# Altium footprint library 2.10-LQFP封装.PcbLib: 97 footprints (part 5 of 7)
Each footprint in its own frame and in the unit in brackets; x right, y up, seen from the top. Pads: shape width x height; smd on the part's side, far side on the other; paste and mask are expansions set on the pad; w line width, h text height; cw(c..) or ccw(c..) is an arc to the next point about the centre after c.
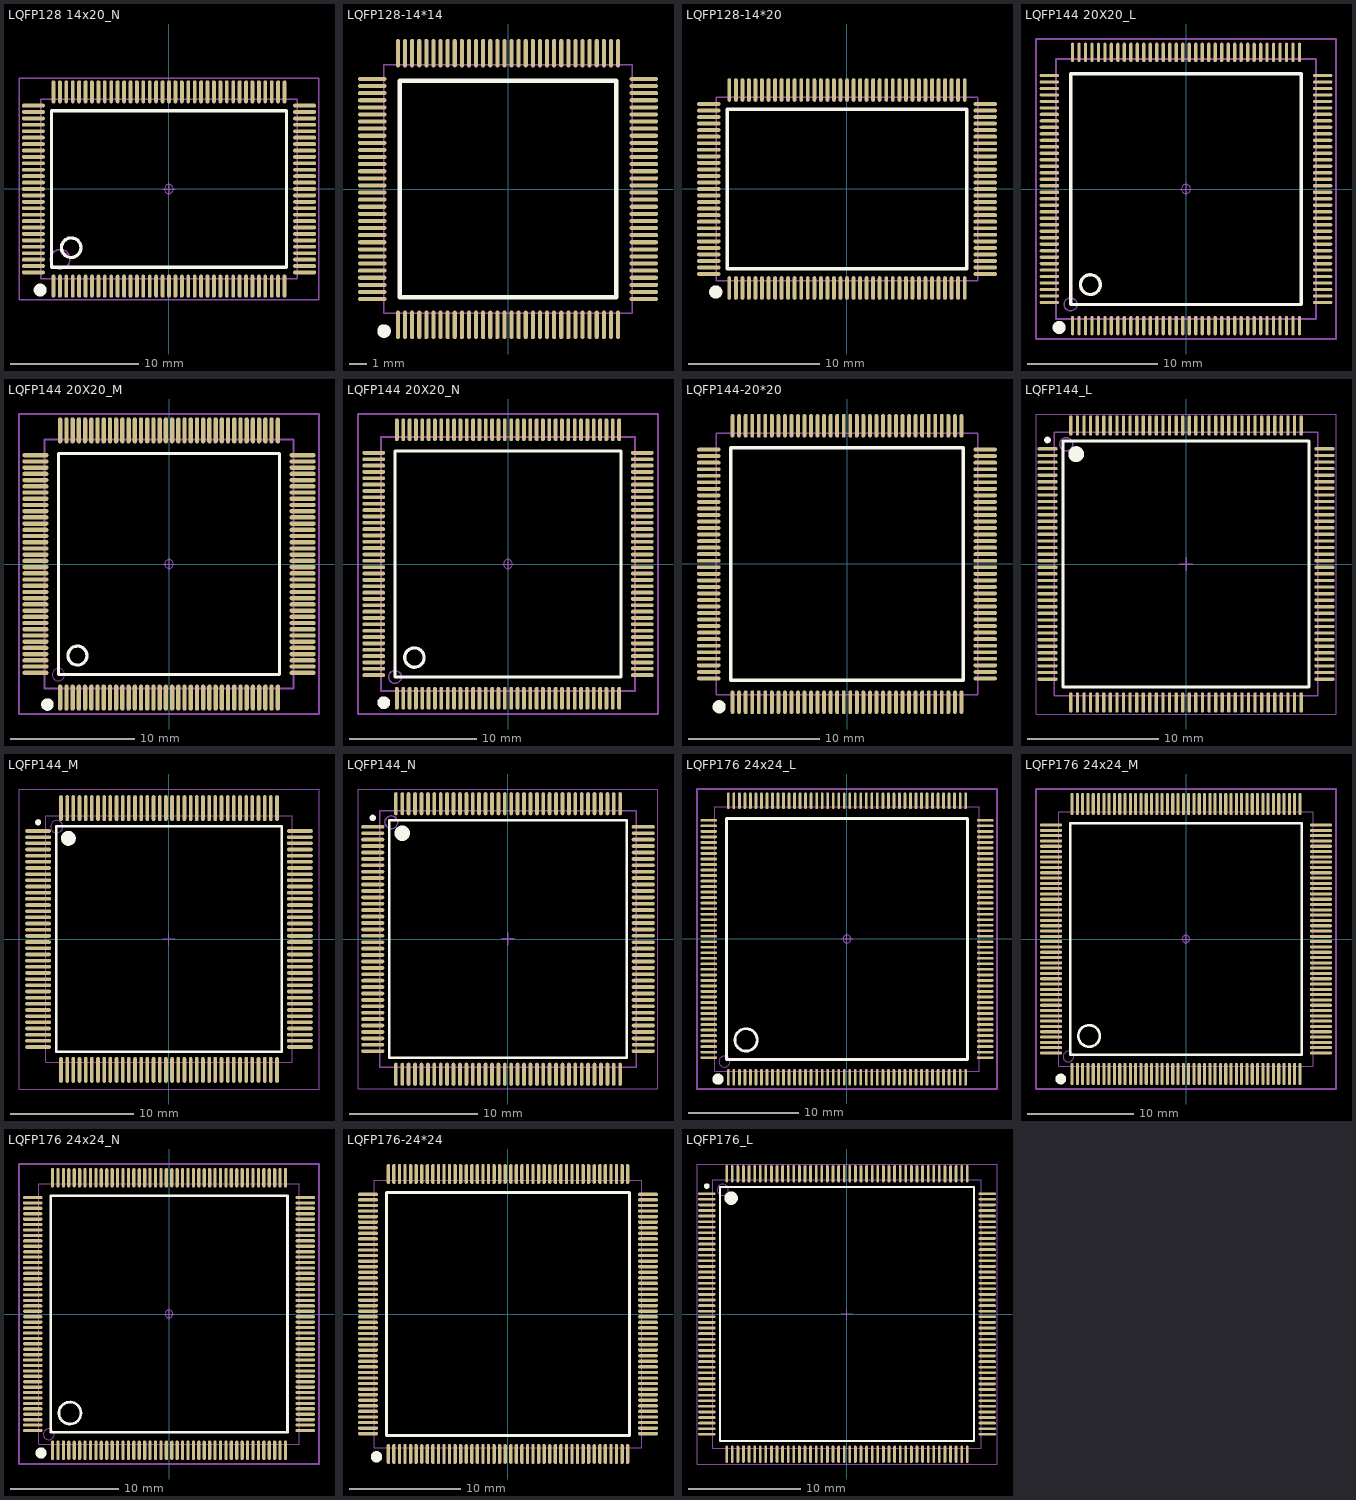
[diagram p4: the footprints below, top view; thin cyan lines are the x and y axes]

## LQFP128 14x20_N [mm] "128脚，体宽：14x20mm, 脚距：0.5mm           淘宝ID:黄晶宝石"
pads (128):
  oval 0.3x1.8 smd: 1(-8.998,-7.571) 2(-8.498,-7.571) 3(-7.998,-7.571) 4(-7.498,-7.571) 5(-6.998,-7.571) 6(-6.498,-7.571) 7(-5.998,-7.571) 8(-5.498,-7.571) 9(-4.998,-7.571) 10(-4.498,-7.571) 11(-3.998,-7.571) 12(-3.498,-7.571) 13(-2.998,-7.571) 14(-2.498,-7.571) 15(-1.998,-7.571) 16(-1.498,-7.571) 17(-0.998,-7.571) 18(-0.498,-7.571) 19(0.002,-7.571) 20(0.502,-7.571) 21(1.002,-7.571) 22(1.502,-7.571) 23(2.002,-7.571) 24(2.502,-7.571) 25(3.002,-7.571) 26(3.502,-7.571) 27(4.002,-7.571) 28(4.502,-7.571) 29(5.002,-7.571) 30(5.502,-7.571) 31(6.002,-7.571) 32(6.502,-7.571) 33(7.002,-7.571) 34(7.502,-7.571) 35(8.002,-7.571) 36(8.502,-7.571) 37(9.002,-7.571) 65(9.002,7.566) 66(8.502,7.566) 67(8.002,7.566) 68(7.502,7.566) 69(7.002,7.566) 70(6.502,7.566) 71(6.002,7.566) 72(5.502,7.566) 73(5.002,7.566) 74(4.502,7.566) 75(4.002,7.566) 76(3.502,7.566) 77(3.002,7.566) 78(2.502,7.566) 79(2.002,7.566) 80(1.502,7.566) 81(1.002,7.566) 82(0.502,7.566) 83(0.002,7.566) 84(-0.498,7.566) 85(-0.998,7.566) 86(-1.498,7.566) 87(-1.998,7.566) 88(-2.498,7.566) 89(-2.998,7.566) 90(-3.498,7.566) 91(-3.998,7.566) 92(-4.498,7.566) 93(-4.998,7.566) 94(-5.498,7.566) 95(-5.998,7.566) 96(-6.498,7.566) 97(-6.998,7.566) 98(-7.498,7.566) 99(-7.998,7.566) 100(-8.498,7.566) 101(-8.998,7.566)
  oval 1.8x0.3 smd: 38(10.57,-6.502) 39(10.57,-6.002) 40(10.57,-5.502) 41(10.57,-5.002) 42(10.57,-4.502) 43(10.57,-4.002) 44(10.57,-3.502) 45(10.57,-3.002) 46(10.57,-2.502) 47(10.57,-2.002) 48(10.57,-1.502) 49(10.57,-1.002) 50(10.57,-0.502) 51(10.57,-0.002) 52(10.57,0.498) 53(10.57,0.998) 54(10.57,1.498) 55(10.57,1.998) 56(10.57,2.498) 57(10.57,2.998) 58(10.57,3.498) 59(10.57,3.998) 60(10.57,4.498) 61(10.57,4.998) 62(10.57,5.498) 63(10.57,5.998) 64(10.57,6.498) 102(-10.566,6.498) 103(-10.566,5.998) 104(-10.566,5.498) 105(-10.566,4.998) 106(-10.566,4.498) 107(-10.566,3.998) 108(-10.566,3.498) 109(-10.566,2.998) 110(-10.566,2.498) 111(-10.566,1.998) 112(-10.566,1.498) 113(-10.566,0.998) 114(-10.566,0.498) 115(-10.566,-0.002) 116(-10.566,-0.502) 117(-10.566,-1.002) 118(-10.566,-1.502) 119(-10.566,-2.002) 120(-10.566,-2.502) 121(-10.566,-3.002) 122(-10.566,-3.502) 123(-10.566,-4.002) 124(-10.566,-4.502) 125(-10.566,-5.002) 126(-10.566,-5.502) 127(-10.566,-6.002) 128(-10.566,-6.502)
Top Overlay:
  circle w0.508: c-10.033,-7.874 r0.25
  circle w0.254: c-7.618,-4.574 r0.762
  lines w0.254: -9.142,-6.098 9.146,-6.098 9.146,6.094 -9.142,6.094 -9.142,-6.098
Mechanical 13:
  circle w0.1: c-8.474,-5.478 r0.762
  lines w0.1: -9.998,-7.002 -9.998,6.998 10.002,6.998 10.002,-7.002 -9.998,-7.002
Mechanical 15:
  circle w0.05: c0.002,-0.002 r0.35
  lines w0.05: -0.498,-0.002 0.502,-0.002 ; 0.002,-0.502 0.002,0.498
  lines w0.1: -11.682,-8.638 11.686,-8.638 11.686,8.634 -11.682,8.634 -11.682,-8.638
3D body "LQFP128-14x20.STEP": height 1.45, standoff -0.01, extent -11.001,-8.005 11.005,8

## LQFP128-14*14 [mm] "14x14mm, 0.4mm       淘宝ID:黄晶宝石"
pads (128):
  oval 0.23x1.6 smd: 1(-6.2,-7.648) 2(-5.8,-7.648) 3(-5.4,-7.648) 4(-5,-7.648) 5(-4.6,-7.648) 6(-4.2,-7.648) 7(-3.8,-7.648) 8(-3.4,-7.648) 9(-3,-7.648) 10(-2.6,-7.648) 11(-2.2,-7.648) 12(-1.8,-7.648) 13(-1.4,-7.648) 14(-1,-7.648) 15(-0.6,-7.648) 16(-0.2,-7.648) 17(0.2,-7.648) 18(0.6,-7.648) 19(1,-7.648) 20(1.4,-7.648) 21(1.8,-7.648) 22(2.2,-7.648) 23(2.6,-7.648) 24(3,-7.648) 25(3.4,-7.648) 26(3.8,-7.648) 27(4.2,-7.648) 28(4.6,-7.648) 29(5,-7.648) 30(5.4,-7.648) 31(5.8,-7.648) 32(6.2,-7.648) 65(6.2,7.653) 66(5.8,7.653) 67(5.4,7.653) 68(5,7.653) 69(4.6,7.653) 70(4.2,7.653) 71(3.8,7.653) 72(3.4,7.653) 73(3,7.653) 74(2.6,7.653) 75(2.2,7.653) 76(1.8,7.653) 77(1.4,7.653) 78(1,7.653) 79(0.6,7.653) 80(0.2,7.653) 81(-0.2,7.653) 82(-0.6,7.653) 83(-1,7.653) 84(-1.4,7.653) 85(-1.8,7.653) 86(-2.2,7.653) 87(-2.6,7.653) 88(-3,7.653) 89(-3.4,7.653) 90(-3.8,7.653) 91(-4.2,7.653) 92(-4.6,7.653) 93(-5,7.653) 94(-5.4,7.653) 95(-5.8,7.653) 96(-6.2,7.653)
  oval 1.6x0.23 smd: 33(7.651,-6.198) 34(7.651,-5.798) 35(7.651,-5.398) 36(7.651,-4.998) 37(7.651,-4.598) 38(7.651,-4.198) 39(7.651,-3.798) 40(7.651,-3.398) 41(7.651,-2.998) 42(7.651,-2.598) 43(7.651,-2.198) 44(7.651,-1.798) 45(7.651,-1.398) 46(7.651,-0.998) 47(7.651,-0.598) 48(7.651,-0.198) 49(7.651,0.202) 50(7.651,0.602) 51(7.651,1.002) 52(7.651,1.402) 53(7.651,1.802) 54(7.651,2.202) 55(7.651,2.602) 56(7.651,3.002) 57(7.651,3.402) 58(7.651,3.802) 59(7.651,4.202) 60(7.651,4.602) 61(7.651,5.002) 62(7.651,5.402) 63(7.651,5.802) 64(7.651,6.202) 97(-7.651,6.202) 98(-7.651,5.802) 99(-7.651,5.402) 100(-7.651,5.002) 101(-7.651,4.602) 102(-7.651,4.202) 103(-7.651,3.802) 104(-7.651,3.402) 105(-7.651,3.002) 106(-7.651,2.602) 107(-7.651,2.202) 108(-7.651,1.802) 109(-7.651,1.402) 110(-7.651,1.002) 111(-7.651,0.602) 112(-7.651,0.202) 113(-7.651,-0.198) 114(-7.651,-0.598) 115(-7.651,-0.998) 116(-7.651,-1.398) 117(-7.651,-1.798) 118(-7.651,-2.198) 119(-7.651,-2.598) 120(-7.651,-2.998) 121(-7.651,-3.398) 122(-7.651,-3.798) 123(-7.651,-4.198) 124(-7.651,-4.598) 125(-7.651,-4.998) 126(-7.651,-5.398) 127(-7.651,-5.798) 128(-7.651,-6.198)
Top Overlay:
  circle w0.508: c-6.985,-8.001 r0.127
  lines w0.254: -6.096,-6.094 6.096,-6.094 6.096,6.098 -6.096,6.098 -6.096,-6.094
Mechanical 13:
  lines w0.1: -7,-6.998 -7,7.002 7,7.002 7,-6.998 -7,-6.998
3D body "LQFP128-14x14.STEP": height 1.45, standoff 0, extent -8.003,-8.003 8.003,8.003

## LQFP128-14*20 [mm] "14x20mm, 0.5mm       淘宝ID:黄晶宝石"
pads (128):
  oval 0.3x1.8 smd: 1(-8.998,-7.571) 2(-8.498,-7.571) 3(-7.998,-7.571) 4(-7.498,-7.571) 5(-6.998,-7.571) 6(-6.498,-7.571) 7(-5.998,-7.571) 8(-5.498,-7.571) 9(-4.998,-7.571) 10(-4.498,-7.571) 11(-3.998,-7.571) 12(-3.498,-7.571) 13(-2.998,-7.571) 14(-2.498,-7.571) 15(-1.998,-7.571) 16(-1.498,-7.571) 17(-0.998,-7.571) 18(-0.498,-7.571) 19(0.002,-7.571) 20(0.502,-7.571) 21(1.002,-7.571) 22(1.502,-7.571) 23(2.002,-7.571) 24(2.502,-7.571) 25(3.002,-7.571) 26(3.502,-7.571) 27(4.002,-7.571) 28(4.502,-7.571) 29(5.002,-7.571) 30(5.502,-7.571) 31(6.002,-7.571) 32(6.502,-7.571) 33(7.002,-7.571) 34(7.502,-7.571) 35(8.002,-7.571) 36(8.502,-7.571) 37(9.002,-7.571) 65(9.002,7.566) 66(8.502,7.566) 67(8.002,7.566) 68(7.502,7.566) 69(7.002,7.566) 70(6.502,7.566) 71(6.002,7.566) 72(5.502,7.566) 73(5.002,7.566) 74(4.502,7.566) 75(4.002,7.566) 76(3.502,7.566) 77(3.002,7.566) 78(2.502,7.566) 79(2.002,7.566) 80(1.502,7.566) 81(1.002,7.566) 82(0.502,7.566) 83(0.002,7.566) 84(-0.498,7.566) 85(-0.998,7.566) 86(-1.498,7.566) 87(-1.998,7.566) 88(-2.498,7.566) 89(-2.998,7.566) 90(-3.498,7.566) 91(-3.998,7.566) 92(-4.498,7.566) 93(-4.998,7.566) 94(-5.498,7.566) 95(-5.998,7.566) 96(-6.498,7.566) 97(-6.998,7.566) 98(-7.498,7.566) 99(-7.998,7.566) 100(-8.498,7.566) 101(-8.998,7.566)
  oval 1.8x0.3 smd: 38(10.57,-6.502) 39(10.57,-6.002) 40(10.57,-5.502) 41(10.57,-5.002) 42(10.57,-4.502) 43(10.57,-4.002) 44(10.57,-3.502) 45(10.57,-3.002) 46(10.57,-2.502) 47(10.57,-2.002) 48(10.57,-1.502) 49(10.57,-1.002) 50(10.57,-0.502) 51(10.57,-0.002) 52(10.57,0.498) 53(10.57,0.998) 54(10.57,1.498) 55(10.57,1.998) 56(10.57,2.498) 57(10.57,2.998) 58(10.57,3.498) 59(10.57,3.998) 60(10.57,4.498) 61(10.57,4.998) 62(10.57,5.498) 63(10.57,5.998) 64(10.57,6.498) 102(-10.566,6.498) 103(-10.566,5.998) 104(-10.566,5.498) 105(-10.566,4.998) 106(-10.566,4.498) 107(-10.566,3.998) 108(-10.566,3.498) 109(-10.566,2.998) 110(-10.566,2.498) 111(-10.566,1.998) 112(-10.566,1.498) 113(-10.566,0.998) 114(-10.566,0.498) 115(-10.566,-0.002) 116(-10.566,-0.502) 117(-10.566,-1.002) 118(-10.566,-1.502) 119(-10.566,-2.002) 120(-10.566,-2.502) 121(-10.566,-3.002) 122(-10.566,-3.502) 123(-10.566,-4.002) 124(-10.566,-4.502) 125(-10.566,-5.002) 126(-10.566,-5.502) 127(-10.566,-6.002) 128(-10.566,-6.502)
Top Overlay:
  circle w0.508: c-10.033,-7.874 r0.25
  lines w0.254: -9.142,-6.098 9.146,-6.098 9.146,6.094 -9.142,6.094 -9.142,-6.098
Mechanical 13:
  lines w0.1: -9.998,-7.002 -9.998,6.998 10.002,6.998 10.002,-7.002 -9.998,-7.002
3D body "LQFP128-14x20.STEP": height 1.45, standoff 0, extent -11.003,-8.003 11.003,8.003

## LQFP144 20X20_L [mm] "144脚，体宽20x20mm，脚距0.5mm"
pads (144):
  oval 0.25x1.5 smd: 1(-8.75,-10.525) 2(-8.25,-10.525) 3(-7.75,-10.525) 4(-7.25,-10.525) 5(-6.75,-10.525) 6(-6.25,-10.525) 7(-5.75,-10.525) 8(-5.25,-10.525) 9(-4.75,-10.525) 10(-4.25,-10.525) 11(-3.75,-10.525) 12(-3.25,-10.525) 13(-2.75,-10.525) 14(-2.25,-10.525) 15(-1.75,-10.525) 16(-1.25,-10.525) 17(-0.75,-10.525) 18(-0.25,-10.525) 19(0.25,-10.525) 20(0.75,-10.525) 21(1.25,-10.525) 22(1.75,-10.525) 23(2.25,-10.525) 24(2.75,-10.525) 25(3.25,-10.525) 26(3.75,-10.525) 27(4.25,-10.525) 28(4.75,-10.525) 29(5.25,-10.525) 30(5.75,-10.525) 31(6.25,-10.525) 32(6.75,-10.525) 33(7.25,-10.525) 34(7.75,-10.525) 35(8.25,-10.525) 36(8.75,-10.525) 73(8.75,10.525) 74(8.25,10.525) 75(7.75,10.525) 76(7.25,10.525) 77(6.75,10.525) 78(6.25,10.525) 79(5.75,10.525) 80(5.25,10.525) 81(4.75,10.525) 82(4.25,10.525) 83(3.75,10.525) 84(3.25,10.525) 85(2.75,10.525) 86(2.25,10.525) 87(1.75,10.525) 88(1.25,10.525) 89(0.75,10.525) 90(0.25,10.525) 91(-0.25,10.525) 92(-0.75,10.525) 93(-1.25,10.525) 94(-1.75,10.525) 95(-2.25,10.525) 96(-2.75,10.525) 97(-3.25,10.525) 98(-3.75,10.525) 99(-4.25,10.525) 100(-4.75,10.525) 101(-5.25,10.525) 102(-5.75,10.525) 103(-6.25,10.525) 104(-6.75,10.525) 105(-7.25,10.525) 106(-7.75,10.525) 107(-8.25,10.525) 108(-8.75,10.525)
  oval 1.5x0.25 smd: 37(10.525,-8.75) 38(10.525,-8.25) 39(10.525,-7.75) 40(10.525,-7.25) 41(10.525,-6.75) 42(10.525,-6.25) 43(10.525,-5.75) 44(10.525,-5.25) 45(10.525,-4.75) 46(10.525,-4.25) 47(10.525,-3.75) 48(10.525,-3.25) 49(10.525,-2.75) 50(10.525,-2.25) 51(10.525,-1.75) 52(10.525,-1.25) 53(10.525,-0.75) 54(10.525,-0.25) 55(10.525,0.25) 56(10.525,0.75) 57(10.525,1.25) 58(10.525,1.75) 59(10.525,2.25) 60(10.525,2.75) 61(10.525,3.25) 62(10.525,3.75) 63(10.525,4.25) 64(10.525,4.75) 65(10.525,5.25) 66(10.525,5.75) 67(10.525,6.25) 68(10.525,6.75) 69(10.525,7.25) 70(10.525,7.75) 71(10.525,8.25) 72(10.525,8.75) 109(-10.525,8.75) 110(-10.525,8.25) 111(-10.525,7.75) 112(-10.525,7.25) 113(-10.525,6.75) 114(-10.525,6.25) 115(-10.525,5.75) 116(-10.525,5.25) 117(-10.525,4.75) 118(-10.525,4.25) 119(-10.525,3.75) 120(-10.525,3.25) 121(-10.525,2.75) 122(-10.525,2.25) 123(-10.525,1.75) 124(-10.525,1.25) 125(-10.525,0.75) 126(-10.525,0.25) 127(-10.525,-0.25) 128(-10.525,-0.75) 129(-10.525,-1.25) 130(-10.525,-1.75) 131(-10.525,-2.25) 132(-10.525,-2.75) 133(-10.525,-3.25) 134(-10.525,-3.75) 135(-10.525,-4.25) 136(-10.525,-4.75) 137(-10.525,-5.25) 138(-10.525,-5.75) 139(-10.525,-6.25) 140(-10.525,-6.75) 141(-10.525,-7.25) 142(-10.525,-7.75) 143(-10.525,-8.25) 144(-10.525,-8.75)
Top Overlay:
  circle w0.254: c-7.366,-7.366 r0.762
  circle w0.508: c-9.779,-10.668 r0.25
  lines w0.254: -8.89,-8.892 8.89,-8.892 8.89,8.89 -8.89,8.89 -8.89,-8.892
Mechanical 13:
  circle w0.1: c-8.894,-8.894 r0.5
  lines w0.15: -10,-10 -10,10 10,10 10,-10 -10,-10
Mechanical 15:
  circle w0.05: c0,0 r0.35
  lines w0.05: -0.5,0 0.5,0 ; 0,-0.5 0,0.5
  lines w0.15: -11.557,-11.557 11.557,-11.557 11.557,11.557 -11.557,11.557 -11.557,-11.557
3D body "LQFP144-20x20.STEP": height 1.45, standoff -0.01, extent -11.003,-11.003 11.003,11.003

## LQFP144 20X20_M [mm] "144脚，体宽20x20mm，脚距0.5mm"
pads (144):
  oval 0.35x2.1 smd: 1(-8.75,-10.747) 2(-8.25,-10.747) 3(-7.75,-10.747) 4(-7.25,-10.747) 5(-6.75,-10.747) 6(-6.25,-10.747) 7(-5.75,-10.747) 8(-5.25,-10.747) 9(-4.75,-10.747) 10(-4.25,-10.747) 11(-3.75,-10.747) 12(-3.25,-10.747) 13(-2.75,-10.747) 14(-2.25,-10.747) 15(-1.75,-10.747) 16(-1.25,-10.747) 17(-0.75,-10.747) 18(-0.25,-10.747) 19(0.25,-10.747) 20(0.75,-10.747) 21(1.25,-10.747) 22(1.75,-10.747) 23(2.25,-10.747) 24(2.75,-10.747) 25(3.25,-10.747) 26(3.75,-10.747) 27(4.25,-10.747) 28(4.75,-10.747) 29(5.25,-10.747) 30(5.75,-10.747) 31(6.25,-10.747) 32(6.75,-10.747) 33(7.25,-10.747) 34(7.75,-10.747) 35(8.25,-10.747) 36(8.75,-10.747) 73(8.75,10.747) 74(8.25,10.747) 75(7.75,10.747) 76(7.25,10.747) 77(6.75,10.747) 78(6.25,10.747) 79(5.75,10.747) 80(5.25,10.747) 81(4.75,10.747) 82(4.25,10.747) 83(3.75,10.747) 84(3.25,10.747) 85(2.75,10.747) 86(2.25,10.747) 87(1.75,10.747) 88(1.25,10.747) 89(0.75,10.747) 90(0.25,10.747) 91(-0.25,10.747) 92(-0.75,10.747) 93(-1.25,10.747) 94(-1.75,10.747) 95(-2.25,10.747) 96(-2.75,10.747) 97(-3.25,10.747) 98(-3.75,10.747) 99(-4.25,10.747) 100(-4.75,10.747) 101(-5.25,10.747) 102(-5.75,10.747) 103(-6.25,10.747) 104(-6.75,10.747) 105(-7.25,10.747) 106(-7.75,10.747) 107(-8.25,10.747) 108(-8.75,10.747)
  oval 2.1x0.35 smd: 37(10.747,-8.75) 38(10.747,-8.25) 39(10.747,-7.75) 40(10.747,-7.25) 41(10.747,-6.75) 42(10.747,-6.25) 43(10.747,-5.75) 44(10.747,-5.25) 45(10.747,-4.75) 46(10.747,-4.25) 47(10.747,-3.75) 48(10.747,-3.25) 49(10.747,-2.75) 50(10.747,-2.25) 51(10.747,-1.75) 52(10.747,-1.25) 53(10.747,-0.75) 54(10.747,-0.25) 55(10.747,0.25) 56(10.747,0.75) 57(10.747,1.25) 58(10.747,1.75) 59(10.747,2.25) 60(10.747,2.75) 61(10.747,3.25) 62(10.747,3.75) 63(10.747,4.25) 64(10.747,4.75) 65(10.747,5.25) 66(10.747,5.75) 67(10.747,6.25) 68(10.747,6.75) 69(10.747,7.25) 70(10.747,7.75) 71(10.747,8.25) 72(10.747,8.75) 109(-10.747,8.75) 110(-10.747,8.25) 111(-10.747,7.75) 112(-10.747,7.25) 113(-10.747,6.75) 114(-10.747,6.25) 115(-10.747,5.75) 116(-10.747,5.25) 117(-10.747,4.75) 118(-10.747,4.25) 119(-10.747,3.75) 120(-10.747,3.25) 121(-10.747,2.75) 122(-10.747,2.25) 123(-10.747,1.75) 124(-10.747,1.25) 125(-10.747,0.75) 126(-10.747,0.25) 127(-10.747,-0.25) 128(-10.747,-0.75) 129(-10.747,-1.25) 130(-10.747,-1.75) 131(-10.747,-2.25) 132(-10.747,-2.75) 133(-10.747,-3.25) 134(-10.747,-3.75) 135(-10.747,-4.25) 136(-10.747,-4.75) 137(-10.747,-5.25) 138(-10.747,-5.75) 139(-10.747,-6.25) 140(-10.747,-6.75) 141(-10.747,-7.25) 142(-10.747,-7.75) 143(-10.747,-8.25) 144(-10.747,-8.75)
Top Overlay:
  circle w0.508: c-9.779,-11.303 r0.25
  circle w0.254: c-7.366,-7.366 r0.762
  lines w0.254: -8.89,-8.892 8.89,-8.892 8.89,8.89 -8.89,8.89 -8.89,-8.892
Mechanical 13:
  circle w0.1: c-8.894,-8.894 r0.5
  lines w0.15: -10,-10 -10,10 10,10 10,-10 -10,-10
Mechanical 15:
  circle w0.05: c0,0 r0.35
  lines w0.05: -0.5,0 0.5,0 ; 0,-0.5 0,0.5
  lines w0.15: -12.065,-12.065 12.065,-12.065 12.065,12.065 -12.065,12.065 -12.065,-12.065
3D body "LQFP144-20x20.STEP": height 1.45, standoff -0.01, extent -11.003,-11.003 11.003,11.003

## LQFP144 20X20_N [mm] "144脚，体宽20x20mm，脚距0.5mm"
pads (144):
  oval 0.3x1.8 smd: 1(-8.75,-10.573) 2(-8.25,-10.573) 3(-7.75,-10.573) 4(-7.25,-10.573) 5(-6.75,-10.573) 6(-6.25,-10.573) 7(-5.75,-10.573) 8(-5.25,-10.573) 9(-4.75,-10.573) 10(-4.25,-10.573) 11(-3.75,-10.573) 12(-3.25,-10.573) 13(-2.75,-10.573) 14(-2.25,-10.573) 15(-1.75,-10.573) 16(-1.25,-10.573) 17(-0.75,-10.573) 18(-0.25,-10.573) 19(0.25,-10.573) 20(0.75,-10.573) 21(1.25,-10.573) 22(1.75,-10.573) 23(2.25,-10.573) 24(2.75,-10.573) 25(3.25,-10.573) 26(3.75,-10.573) 27(4.25,-10.573) 28(4.75,-10.573) 29(5.25,-10.573) 30(5.75,-10.573) 31(6.25,-10.573) 32(6.75,-10.573) 33(7.25,-10.573) 34(7.75,-10.573) 35(8.25,-10.573) 36(8.75,-10.573) 73(8.75,10.573) 74(8.25,10.573) 75(7.75,10.573) 76(7.25,10.573) 77(6.75,10.573) 78(6.25,10.573) 79(5.75,10.573) 80(5.25,10.573) 81(4.75,10.573) 82(4.25,10.573) 83(3.75,10.573) 84(3.25,10.573) 85(2.75,10.573) 86(2.25,10.573) 87(1.75,10.573) 88(1.25,10.573) 89(0.75,10.573) 90(0.25,10.573) 91(-0.25,10.573) 92(-0.75,10.573) 93(-1.25,10.573) 94(-1.75,10.573) 95(-2.25,10.573) 96(-2.75,10.573) 97(-3.25,10.573) 98(-3.75,10.573) 99(-4.25,10.573) 100(-4.75,10.573) 101(-5.25,10.573) 102(-5.75,10.573) 103(-6.25,10.573) 104(-6.75,10.573) 105(-7.25,10.573) 106(-7.75,10.573) 107(-8.25,10.573) 108(-8.75,10.573)
  oval 1.8x0.3 smd: 37(10.573,-8.75) 38(10.573,-8.25) 39(10.573,-7.75) 40(10.573,-7.25) 41(10.573,-6.75) 42(10.573,-6.25) 43(10.573,-5.75) 44(10.573,-5.25) 45(10.573,-4.75) 46(10.573,-4.25) 47(10.573,-3.75) 48(10.573,-3.25) 49(10.573,-2.75) 50(10.573,-2.25) 51(10.573,-1.75) 52(10.573,-1.25) 53(10.573,-0.75) 54(10.573,-0.25) 55(10.573,0.25) 56(10.573,0.75) 57(10.573,1.25) 58(10.573,1.75) 59(10.573,2.25) 60(10.573,2.75) 61(10.573,3.25) 62(10.573,3.75) 63(10.573,4.25) 64(10.573,4.75) 65(10.573,5.25) 66(10.573,5.75) 67(10.573,6.25) 68(10.573,6.75) 69(10.573,7.25) 70(10.573,7.75) 71(10.573,8.25) 72(10.573,8.75) 109(-10.573,8.75) 110(-10.573,8.25) 111(-10.573,7.75) 112(-10.573,7.25) 113(-10.573,6.75) 114(-10.573,6.25) 115(-10.573,5.75) 116(-10.573,5.25) 117(-10.573,4.75) 118(-10.573,4.25) 119(-10.573,3.75) 120(-10.573,3.25) 121(-10.573,2.75) 122(-10.573,2.25) 123(-10.573,1.75) 124(-10.573,1.25) 125(-10.573,0.75) 126(-10.573,0.25) 127(-10.573,-0.25) 128(-10.573,-0.75) 129(-10.573,-1.25) 130(-10.573,-1.75) 131(-10.573,-2.25) 132(-10.573,-2.75) 133(-10.573,-3.25) 134(-10.573,-3.75) 135(-10.573,-4.25) 136(-10.573,-4.75) 137(-10.573,-5.25) 138(-10.573,-5.75) 139(-10.573,-6.25) 140(-10.573,-6.75) 141(-10.573,-7.25) 142(-10.573,-7.75) 143(-10.573,-8.25) 144(-10.573,-8.75)
Top Overlay:
  circle w0.508: c-9.779,-10.922 r0.25
  circle w0.254: c-7.366,-7.366 r0.762
  lines w0.254: -8.89,-8.892 -8.89,8.89 8.89,8.89 8.89,-8.892 -8.89,-8.892
Mechanical 13:
  circle w0.1: c-8.894,-8.894 r0.5
  lines w0.15: -10,-10 10,-10 10,10 -10,10 -10,-10
Mechanical 15:
  circle w0.05: c0,0 r0.35
  lines w0.05: -0.5,0 0.5,0 ; 0,-0.5 0,0.5
  lines w0.15: -11.811,-11.811 -11.811,11.811 11.811,11.811 11.811,-11.811 -11.811,-11.811
3D body "LQFP144-20x20.STEP": height 1.45, standoff -0.01, extent -11.003,-11.003 11.003,11.003

## LQFP144-20*20 [mm] "20x20mm，0.5mm       淘宝ID:黄晶宝石"
pads (144):
  oval 0.3x1.8 smd: 1(-8.75,-10.573) 2(-8.25,-10.573) 3(-7.75,-10.573) 4(-7.25,-10.573) 5(-6.75,-10.573) 6(-6.25,-10.573) 7(-5.75,-10.573) 8(-5.25,-10.573) 9(-4.75,-10.573) 10(-4.25,-10.573) 11(-3.75,-10.573) 12(-3.25,-10.573) 13(-2.75,-10.573) 14(-2.25,-10.573) 15(-1.75,-10.573) 16(-1.25,-10.573) 17(-0.75,-10.573) 18(-0.25,-10.573) 19(0.25,-10.573) 20(0.75,-10.573) 21(1.25,-10.573) 22(1.75,-10.573) 23(2.25,-10.573) 24(2.75,-10.573) 25(3.25,-10.573) 26(3.75,-10.573) 27(4.25,-10.573) 28(4.75,-10.573) 29(5.25,-10.573) 30(5.75,-10.573) 31(6.25,-10.573) 32(6.75,-10.573) 33(7.25,-10.573) 34(7.75,-10.573) 35(8.25,-10.573) 36(8.75,-10.573) 73(8.75,10.573) 74(8.25,10.573) 75(7.75,10.573) 76(7.25,10.573) 77(6.75,10.573) 78(6.25,10.573) 79(5.75,10.573) 80(5.25,10.573) 81(4.75,10.573) 82(4.25,10.573) 83(3.75,10.573) 84(3.25,10.573) 85(2.75,10.573) 86(2.25,10.573) 87(1.75,10.573) 88(1.25,10.573) 89(0.75,10.573) 90(0.25,10.573) 91(-0.25,10.573) 92(-0.75,10.573) 93(-1.25,10.573) 94(-1.75,10.573) 95(-2.25,10.573) 96(-2.75,10.573) 97(-3.25,10.573) 98(-3.75,10.573) 99(-4.25,10.573) 100(-4.75,10.573) 101(-5.25,10.573) 102(-5.75,10.573) 103(-6.25,10.573) 104(-6.75,10.573) 105(-7.25,10.573) 106(-7.75,10.573) 107(-8.25,10.573) 108(-8.75,10.573)
  oval 1.8x0.3 smd: 37(10.573,-8.75) 38(10.573,-8.25) 39(10.573,-7.75) 40(10.573,-7.25) 41(10.573,-6.75) 42(10.573,-6.25) 43(10.573,-5.75) 44(10.573,-5.25) 45(10.573,-4.75) 46(10.573,-4.25) 47(10.573,-3.75) 48(10.573,-3.25) 49(10.573,-2.75) 50(10.573,-2.25) 51(10.573,-1.75) 52(10.573,-1.25) 53(10.573,-0.75) 54(10.573,-0.25) 55(10.573,0.25) 56(10.573,0.75) 57(10.573,1.25) 58(10.573,1.75) 59(10.573,2.25) 60(10.573,2.75) 61(10.573,3.25) 62(10.573,3.75) 63(10.573,4.25) 64(10.573,4.75) 65(10.573,5.25) 66(10.573,5.75) 67(10.573,6.25) 68(10.573,6.75) 69(10.573,7.25) 70(10.573,7.75) 71(10.573,8.25) 72(10.573,8.75) 109(-10.573,8.75) 110(-10.573,8.25) 111(-10.573,7.75) 112(-10.573,7.25) 113(-10.573,6.75) 114(-10.573,6.25) 115(-10.573,5.75) 116(-10.573,5.25) 117(-10.573,4.75) 118(-10.573,4.25) 119(-10.573,3.75) 120(-10.573,3.25) 121(-10.573,2.75) 122(-10.573,2.25) 123(-10.573,1.75) 124(-10.573,1.25) 125(-10.573,0.75) 126(-10.573,0.25) 127(-10.573,-0.25) 128(-10.573,-0.75) 129(-10.573,-1.25) 130(-10.573,-1.75) 131(-10.573,-2.25) 132(-10.573,-2.75) 133(-10.573,-3.25) 134(-10.573,-3.75) 135(-10.573,-4.25) 136(-10.573,-4.75) 137(-10.573,-5.25) 138(-10.573,-5.75) 139(-10.573,-6.25) 140(-10.573,-6.75) 141(-10.573,-7.25) 142(-10.573,-7.75) 143(-10.573,-8.25) 144(-10.573,-8.75)
Top Overlay:
  circle w0.508: c-9.779,-10.922 r0.25
  lines w0.254: -8.89,-8.892 -8.89,8.89 8.89,8.89 8.89,-8.892 -8.89,-8.892
Mechanical 13:
  lines w0.15: -10,-10 10,-10 10,10 -10,10 -10,-10
3D body "LQFP144-20x20.STEP": height 1.45, standoff 0, extent -11.049,-11.049 10.957,10.957

## LQFP144_L [mm] "封装库来自淘宝 ID：黄晶宝石 Thin QFP, 144-Leads, Body 20x20mm, Pitch 0.5mm, IPC High Density"
height 1.6
pads (144):
  oval 1.55x0.25 smd: 1(-10.525,8.75) 2(-10.525,8.25) 3(-10.525,7.75) 4(-10.525,7.25) 5(-10.525,6.75) 6(-10.525,6.25) 7(-10.525,5.75) 8(-10.525,5.25) 9(-10.525,4.75) 10(-10.525,4.25) 11(-10.525,3.75) 12(-10.525,3.25) 13(-10.525,2.75) 14(-10.525,2.25) 15(-10.525,1.75) 16(-10.525,1.25) 17(-10.525,0.75) 18(-10.525,0.25) 19(-10.525,-0.25) 20(-10.525,-0.75) 21(-10.525,-1.25) 22(-10.525,-1.75) 23(-10.525,-2.25) 24(-10.525,-2.75) 25(-10.525,-3.25) 26(-10.525,-3.75) 27(-10.525,-4.25) 28(-10.525,-4.75) 29(-10.525,-5.25) 30(-10.525,-5.75) 31(-10.525,-6.25) 32(-10.525,-6.75) 33(-10.525,-7.25) 34(-10.525,-7.75) 35(-10.525,-8.25) 36(-10.525,-8.75) 73(10.525,-8.75) 74(10.525,-8.25) 75(10.525,-7.75) 76(10.525,-7.25) 77(10.525,-6.75) 78(10.525,-6.25) 79(10.525,-5.75) 80(10.525,-5.25) 81(10.525,-4.75) 82(10.525,-4.25) 83(10.525,-3.75) 84(10.525,-3.25) 85(10.525,-2.75) 86(10.525,-2.25) 87(10.525,-1.75) 88(10.525,-1.25) 89(10.525,-0.75) 90(10.525,-0.25) 91(10.525,0.25) 92(10.525,0.75) 93(10.525,1.25) 94(10.525,1.75) 95(10.525,2.25) 96(10.525,2.75) 97(10.525,3.25) 98(10.525,3.75) 99(10.525,4.25) 100(10.525,4.75) 101(10.525,5.25) 102(10.525,5.75) 103(10.525,6.25) 104(10.525,6.75) 105(10.525,7.25) 106(10.525,7.75) 107(10.525,8.25) 108(10.525,8.75)
  oval 0.25x1.55 smd: 37(-8.75,-10.525) 38(-8.25,-10.525) 39(-7.75,-10.525) 40(-7.25,-10.525) 41(-6.75,-10.525) 42(-6.25,-10.525) 43(-5.75,-10.525) 44(-5.25,-10.525) 45(-4.75,-10.525) 46(-4.25,-10.525) 47(-3.75,-10.525) 48(-3.25,-10.525) 49(-2.75,-10.525) 50(-2.25,-10.525) 51(-1.75,-10.525) 52(-1.25,-10.525) 53(-0.75,-10.525) 54(-0.25,-10.525) 55(0.25,-10.525) 56(0.75,-10.525) 57(1.25,-10.525) 58(1.75,-10.525) 59(2.25,-10.525) 60(2.75,-10.525) 61(3.25,-10.525) 62(3.75,-10.525) 63(4.25,-10.525) 64(4.75,-10.525) 65(5.25,-10.525) 66(5.75,-10.525) 67(6.25,-10.525) 68(6.75,-10.525) 69(7.25,-10.525) 70(7.75,-10.525) 71(8.25,-10.525) 72(8.75,-10.525) 109(8.75,10.525) 110(8.25,10.525) 111(7.75,10.525) 112(7.25,10.525) 113(6.75,10.525) 114(6.25,10.525) 115(5.75,10.525) 116(5.25,10.525) 117(4.75,10.525) 118(4.25,10.525) 119(3.75,10.525) 120(3.25,10.525) 121(2.75,10.525) 122(2.25,10.525) 123(1.75,10.525) 124(1.25,10.525) 125(0.75,10.525) 126(0.25,10.525) 127(-0.25,10.525) 128(-0.75,10.525) 129(-1.25,10.525) 130(-1.75,10.525) 131(-2.25,10.525) 132(-2.75,10.525) 133(-3.25,10.525) 134(-3.75,10.525) 135(-4.25,10.525) 136(-4.75,10.525) 137(-5.25,10.525) 138(-5.75,10.525) 139(-6.25,10.525) 140(-6.75,10.525) 141(-7.25,10.525) 142(-7.75,10.525) 143(-8.25,10.525) 144(-8.75,10.525)
Top Overlay:
  circle w0.6: c-8.35,8.35 r0.3
  circle w0.25: c-10.525,9.425 r0.125
  lines w0.2: -9.35,-9.35 9.35,-9.35 9.35,9.35 -9.35,9.35 -9.35,-9.35
Mechanical 13:
  circle w0.1: c-9.1,9.1 r0.5
  lines w0.1: -10,-10 10,-10 10,10 -10,10 -10,-10
Mechanical 15:
  lines w0.05: -11.4,-11.4 11.4,-11.4 11.4,11.4 -11.4,11.4 -11.4,-11.4
  lines w0.1: -0.5,0 0.5,0 ; 0,-0.5 0,0.5
3D body "LQFP144-20x20.STEP": height 1.45, standoff -0.01, extent -11.003,-11.049 11.003,10.957

## LQFP144_M [mm] "封装库来自淘宝 ID：黄晶宝石 Thin QFP, 144-Leads, Body 20x20mm, Pitch 0.5mm, IPC Low Density"
height 1.6
pads (144):
  oval 2.1x0.3 smd: 1(-10.6,8.75) 2(-10.6,8.25) 3(-10.6,7.75) 4(-10.6,7.25) 5(-10.6,6.75) 6(-10.6,6.25) 7(-10.6,5.75) 8(-10.6,5.25) 9(-10.6,4.75) 10(-10.6,4.25) 11(-10.6,3.75) 12(-10.6,3.25) 13(-10.6,2.75) 14(-10.6,2.25) 15(-10.6,1.75) 16(-10.6,1.25) 17(-10.6,0.75) 18(-10.6,0.25) 19(-10.6,-0.25) 20(-10.6,-0.75) 21(-10.6,-1.25) 22(-10.6,-1.75) 23(-10.6,-2.25) 24(-10.6,-2.75) 25(-10.6,-3.25) 26(-10.6,-3.75) 27(-10.6,-4.25) 28(-10.6,-4.75) 29(-10.6,-5.25) 30(-10.6,-5.75) 31(-10.6,-6.25) 32(-10.6,-6.75) 33(-10.6,-7.25) 34(-10.6,-7.75) 35(-10.6,-8.25) 36(-10.6,-8.75) 73(10.6,-8.75) 74(10.6,-8.25) 75(10.6,-7.75) 76(10.6,-7.25) 77(10.6,-6.75) 78(10.6,-6.25) 79(10.6,-5.75) 80(10.6,-5.25) 81(10.6,-4.75) 82(10.6,-4.25) 83(10.6,-3.75) 84(10.6,-3.25) 85(10.6,-2.75) 86(10.6,-2.25) 87(10.6,-1.75) 88(10.6,-1.25) 89(10.6,-0.75) 90(10.6,-0.25) 91(10.6,0.25) 92(10.6,0.75) 93(10.6,1.25) 94(10.6,1.75) 95(10.6,2.25) 96(10.6,2.75) 97(10.6,3.25) 98(10.6,3.75) 99(10.6,4.25) 100(10.6,4.75) 101(10.6,5.25) 102(10.6,5.75) 103(10.6,6.25) 104(10.6,6.75) 105(10.6,7.25) 106(10.6,7.75) 107(10.6,8.25) 108(10.6,8.75)
  oval 0.3x2.1 smd: 37(-8.75,-10.6) 38(-8.25,-10.6) 39(-7.75,-10.6) 40(-7.25,-10.6) 41(-6.75,-10.6) 42(-6.25,-10.6) 43(-5.75,-10.6) 44(-5.25,-10.6) 45(-4.75,-10.6) 46(-4.25,-10.6) 47(-3.75,-10.6) 48(-3.25,-10.6) 49(-2.75,-10.6) 50(-2.25,-10.6) 51(-1.75,-10.6) 52(-1.25,-10.6) 53(-0.75,-10.6) 54(-0.25,-10.6) 55(0.25,-10.6) 56(0.75,-10.6) 57(1.25,-10.6) 58(1.75,-10.6) 59(2.25,-10.6) 60(2.75,-10.6) 61(3.25,-10.6) 62(3.75,-10.6) 63(4.25,-10.6) 64(4.75,-10.6) 65(5.25,-10.6) 66(5.75,-10.6) 67(6.25,-10.6) 68(6.75,-10.6) 69(7.25,-10.6) 70(7.75,-10.6) 71(8.25,-10.6) 72(8.75,-10.6) 109(8.75,10.6) 110(8.25,10.6) 111(7.75,10.6) 112(7.25,10.6) 113(6.75,10.6) 114(6.25,10.6) 115(5.75,10.6) 116(5.25,10.6) 117(4.75,10.6) 118(4.25,10.6) 119(3.75,10.6) 120(3.25,10.6) 121(2.75,10.6) 122(2.25,10.6) 123(1.75,10.6) 124(1.25,10.6) 125(0.75,10.6) 126(0.25,10.6) 127(-0.25,10.6) 128(-0.75,10.6) 129(-1.25,10.6) 130(-1.75,10.6) 131(-2.25,10.6) 132(-2.75,10.6) 133(-3.25,10.6) 134(-3.75,10.6) 135(-4.25,10.6) 136(-4.75,10.6) 137(-5.25,10.6) 138(-5.75,10.6) 139(-6.25,10.6) 140(-6.75,10.6) 141(-7.25,10.6) 142(-7.75,10.6) 143(-8.25,10.6) 144(-8.75,10.6)
Top Overlay:
  circle w0.25: c-10.6,9.45 r0.125
  circle w0.6: c-8.15,8.15 r0.3
  lines w0.2: -9.15,-9.15 -9.15,9.15 9.15,9.15 9.15,-9.15 -9.15,-9.15
Mechanical 13:
  circle w0.1: c-9.1,9.1 r0.5
  lines w0.1: -10,-10 -10,10 10,10 10,-10 -10,-10
Mechanical 15:
  lines w0.05: -12.15,-12.15 -12.15,12.15 12.15,12.15 12.15,-12.15 -12.15,-12.15
  lines w0.1: -0.5,0 0.5,0 ; 0,-0.5 0,0.5
3D body "LQFP144-20x20.STEP": height 1.45, standoff -0.01, extent -11.003,-11.049 11.003,10.957

## LQFP144_N [mm] "封装库来自淘宝 ID：黄晶宝石 Thin QFP, 144-Leads, Body 20x20mm, Pitch 0.5mm, IPC Medium Density"
height 1.6
pads (144):
  oval 1.8x0.3 smd: 1(-10.55,8.75) 2(-10.55,8.25) 3(-10.55,7.75) 4(-10.55,7.25) 5(-10.55,6.75) 6(-10.55,6.25) 7(-10.55,5.75) 8(-10.55,5.25) 9(-10.55,4.75) 10(-10.55,4.25) 11(-10.55,3.75) 12(-10.55,3.25) 13(-10.55,2.75) 14(-10.55,2.25) 15(-10.55,1.75) 16(-10.55,1.25) 17(-10.55,0.75) 18(-10.55,0.25) 19(-10.55,-0.25) 20(-10.55,-0.75) 21(-10.55,-1.25) 22(-10.55,-1.75) 23(-10.55,-2.25) 24(-10.55,-2.75) 25(-10.55,-3.25) 26(-10.55,-3.75) 27(-10.55,-4.25) 28(-10.55,-4.75) 29(-10.55,-5.25) 30(-10.55,-5.75) 31(-10.55,-6.25) 32(-10.55,-6.75) 33(-10.55,-7.25) 34(-10.55,-7.75) 35(-10.55,-8.25) 36(-10.55,-8.75) 73(10.55,-8.75) 74(10.55,-8.25) 75(10.55,-7.75) 76(10.55,-7.25) 77(10.55,-6.75) 78(10.55,-6.25) 79(10.55,-5.75) 80(10.55,-5.25) 81(10.55,-4.75) 82(10.55,-4.25) 83(10.55,-3.75) 84(10.55,-3.25) 85(10.55,-2.75) 86(10.55,-2.25) 87(10.55,-1.75) 88(10.55,-1.25) 89(10.55,-0.75) 90(10.55,-0.25) 91(10.55,0.25) 92(10.55,0.75) 93(10.55,1.25) 94(10.55,1.75) 95(10.55,2.25) 96(10.55,2.75) 97(10.55,3.25) 98(10.55,3.75) 99(10.55,4.25) 100(10.55,4.75) 101(10.55,5.25) 102(10.55,5.75) 103(10.55,6.25) 104(10.55,6.75) 105(10.55,7.25) 106(10.55,7.75) 107(10.55,8.25) 108(10.55,8.75)
  oval 0.3x1.8 smd: 37(-8.75,-10.55) 38(-8.25,-10.55) 39(-7.75,-10.55) 40(-7.25,-10.55) 41(-6.75,-10.55) 42(-6.25,-10.55) 43(-5.75,-10.55) 44(-5.25,-10.55) 45(-4.75,-10.55) 46(-4.25,-10.55) 47(-3.75,-10.55) 48(-3.25,-10.55) 49(-2.75,-10.55) 50(-2.25,-10.55) 51(-1.75,-10.55) 52(-1.25,-10.55) 53(-0.75,-10.55) 54(-0.25,-10.55) 55(0.25,-10.55) 56(0.75,-10.55) 57(1.25,-10.55) 58(1.75,-10.55) 59(2.25,-10.55) 60(2.75,-10.55) 61(3.25,-10.55) 62(3.75,-10.55) 63(4.25,-10.55) 64(4.75,-10.55) 65(5.25,-10.55) 66(5.75,-10.55) 67(6.25,-10.55) 68(6.75,-10.55) 69(7.25,-10.55) 70(7.75,-10.55) 71(8.25,-10.55) 72(8.75,-10.55) 109(8.75,10.55) 110(8.25,10.55) 111(7.75,10.55) 112(7.25,10.55) 113(6.75,10.55) 114(6.25,10.55) 115(5.75,10.55) 116(5.25,10.55) 117(4.75,10.55) 118(4.25,10.55) 119(3.75,10.55) 120(3.25,10.55) 121(2.75,10.55) 122(2.25,10.55) 123(1.75,10.55) 124(1.25,10.55) 125(0.75,10.55) 126(0.25,10.55) 127(-0.25,10.55) 128(-0.75,10.55) 129(-1.25,10.55) 130(-1.75,10.55) 131(-2.25,10.55) 132(-2.75,10.55) 133(-3.25,10.55) 134(-3.75,10.55) 135(-4.25,10.55) 136(-4.75,10.55) 137(-5.25,10.55) 138(-5.75,10.55) 139(-6.25,10.55) 140(-6.75,10.55) 141(-7.25,10.55) 142(-7.75,10.55) 143(-8.25,10.55) 144(-8.75,10.55)
Top Overlay:
  circle w0.25: c-10.55,9.45 r0.125
  circle w0.6: c-8.25,8.25 r0.3
  lines w0.2: -9.25,-9.25 -9.25,9.25 9.25,9.25 9.25,-9.25 -9.25,-9.25
Mechanical 13:
  circle w0.1: c-9.1,9.1 r0.5
  lines w0.1: -10,-10 -10,10 10,10 10,-10 -10,-10
Mechanical 15:
  lines w0.05: -11.7,-11.7 -11.7,11.7 11.7,11.7 11.7,-11.7 -11.7,-11.7
  lines w0.1: -0.5,0 0.5,0 ; 0,-0.5 0,0.5
3D body "LQFP144-20x20.STEP": height 1.45, standoff -0.01, extent -11.003,-11.049 11.003,10.957

## LQFP176 24x24_L [mm] "176脚，体宽24x24mm，脚距0.5mm"
height 1.6
pads (176):
  oval 0.25x1.5 smd: 1(-10.75,-12.525) 2(-10.25,-12.525) 3(-9.75,-12.525) 4(-9.25,-12.525) 5(-8.75,-12.525) 6(-8.25,-12.525) 7(-7.75,-12.525) 8(-7.25,-12.525) 9(-6.75,-12.525) 10(-6.25,-12.525) 11(-5.75,-12.525) 12(-5.25,-12.525) 13(-4.75,-12.525) 14(-4.25,-12.525) 15(-3.75,-12.525) 16(-3.25,-12.525) 17(-2.75,-12.525) 18(-2.25,-12.525) 19(-1.75,-12.525) 20(-1.25,-12.525) 21(-0.75,-12.525) 22(-0.25,-12.525) 23(0.25,-12.525) 24(0.75,-12.525) 25(1.25,-12.525) 26(1.75,-12.525) 27(2.25,-12.525) 28(2.75,-12.525) 29(3.25,-12.525) 30(3.75,-12.525) 31(4.25,-12.525) 32(4.75,-12.525) 33(5.25,-12.525) 34(5.75,-12.525) 35(6.25,-12.525) 36(6.75,-12.525) 37(7.25,-12.525) 38(7.75,-12.525) 39(8.25,-12.525) 40(8.75,-12.525) 41(9.25,-12.525) 42(9.75,-12.525) 43(10.25,-12.525) 44(10.75,-12.525) 89(10.75,12.525) 90(10.25,12.525) 91(9.75,12.525) 92(9.25,12.525) 93(8.75,12.525) 94(8.25,12.525) 95(7.75,12.525) 96(7.25,12.525) 97(6.75,12.525) 98(6.25,12.525) 99(5.75,12.525) 100(5.25,12.525) 101(4.75,12.525) 102(4.25,12.525) 103(3.75,12.525) 104(3.25,12.525) 105(2.75,12.525) 106(2.25,12.525) 107(1.75,12.525) 108(1.25,12.525) 109(0.75,12.525) 110(0.25,12.525) 111(-0.25,12.525) 112(-0.75,12.525) 113(-1.25,12.525) 114(-1.75,12.525) 115(-2.25,12.525) 116(-2.75,12.525) 117(-3.25,12.525) 118(-3.75,12.525) 119(-4.25,12.525) 120(-4.75,12.525) 121(-5.25,12.525) 122(-5.75,12.525) 123(-6.25,12.525) 124(-6.75,12.525) 125(-7.25,12.525) 126(-7.75,12.525) 127(-8.25,12.525) 128(-8.75,12.525) 129(-9.25,12.525) 130(-9.75,12.525) 131(-10.25,12.525) 132(-10.75,12.525)
  oval 1.5x0.25 smd: 45(12.525,-10.75) 46(12.525,-10.25) 47(12.525,-9.75) 48(12.525,-9.25) 49(12.525,-8.75) 50(12.525,-8.25) 51(12.525,-7.75) 52(12.525,-7.25) 53(12.525,-6.75) 54(12.525,-6.25) 55(12.525,-5.75) 56(12.525,-5.25) 57(12.525,-4.75) 58(12.525,-4.25) 59(12.525,-3.75) 60(12.525,-3.25) 61(12.525,-2.75) 62(12.525,-2.25) 63(12.525,-1.75) 64(12.525,-1.25) 65(12.525,-0.75) 66(12.525,-0.25) 67(12.525,0.25) 68(12.525,0.75) 69(12.525,1.25) 70(12.525,1.75) 71(12.525,2.25) 72(12.525,2.75) 73(12.525,3.25) 74(12.525,3.75) 75(12.525,4.25) 76(12.525,4.75) 77(12.525,5.25) 78(12.525,5.75) 79(12.525,6.25) 80(12.525,6.75) 81(12.525,7.25) 82(12.525,7.75) 83(12.525,8.25) 84(12.525,8.75) 85(12.525,9.25) 86(12.525,9.75) 87(12.525,10.25) 88(12.525,10.75) 133(-12.525,10.75) 134(-12.525,10.25) 135(-12.525,9.75) 136(-12.525,9.25) 137(-12.525,8.75) 138(-12.525,8.25) 139(-12.525,7.75) 140(-12.525,7.25) 141(-12.525,6.75) 142(-12.525,6.25) 143(-12.525,5.75) 144(-12.525,5.25) 145(-12.525,4.75) 146(-12.525,4.25) 147(-12.525,3.75) 148(-12.525,3.25) 149(-12.525,2.75) 150(-12.525,2.25) 151(-12.525,1.75) 152(-12.525,1.25) 153(-12.525,0.75) 154(-12.525,0.25) 155(-12.525,-0.25) 156(-12.525,-0.75) 157(-12.525,-1.25) 158(-12.525,-1.75) 159(-12.525,-2.25) 160(-12.525,-2.75) 161(-12.525,-3.25) 162(-12.525,-3.75) 163(-12.525,-4.25) 164(-12.525,-4.75) 165(-12.525,-5.25) 166(-12.525,-5.75) 167(-12.525,-6.25) 168(-12.525,-6.75) 169(-12.525,-7.25) 170(-12.525,-7.75) 171(-12.525,-8.25) 172(-12.525,-8.75) 173(-12.525,-9.25) 174(-12.525,-9.75) 175(-12.525,-10.25) 176(-12.525,-10.75)
Top Overlay:
  circle w0.508: c-11.684,-12.7 r0.25
  circle w0.254: c-9.144,-9.144 r1.016
  lines w0.254: -10.922,-10.922 10.922,-10.922 10.922,10.922 -10.922,10.922 -10.922,-10.922
Mechanical 13:
  circle w0.1: c-11.1,-11.1 r0.5
  lines w0.1: -12,-12 12,-12 12,12 -12,12 -12,-12
Mechanical 15:
  circle w0.05: c0,0 r0.35
  lines w0.05: -0.5,0 0.5,0 ; 0,-0.5 0,0.5
  lines w0.15: -13.589,-13.589 13.589,-13.589 13.589,13.589 -13.589,13.589 -13.589,-13.589
3D body "LQFP176-24x24.STEP": height 1.45, standoff -0.01, extent -13.003,-13.003 13.003,13.003

## LQFP176 24x24_M [mm] "176脚，体宽24x24mm，脚距0.5mm           淘宝ID:黄晶宝石"
height 1.6
pads (176):
  oval 0.3x2.1 smd: 1(-10.75,-12.727) 2(-10.25,-12.727) 3(-9.75,-12.727) 4(-9.25,-12.727) 5(-8.75,-12.727) 6(-8.25,-12.727) 7(-7.75,-12.727) 8(-7.25,-12.727) 9(-6.75,-12.727) 10(-6.25,-12.727) 11(-5.75,-12.727) 12(-5.25,-12.727) 13(-4.75,-12.727) 14(-4.25,-12.727) 15(-3.75,-12.727) 16(-3.25,-12.727) 17(-2.75,-12.727) 18(-2.25,-12.727) 19(-1.75,-12.727) 20(-1.25,-12.727) 21(-0.75,-12.727) 22(-0.25,-12.727) 23(0.25,-12.727) 24(0.75,-12.727) 25(1.25,-12.727) 26(1.75,-12.727) 27(2.25,-12.727) 28(2.75,-12.727) 29(3.25,-12.727) 30(3.75,-12.727) 31(4.25,-12.727) 32(4.75,-12.727) 33(5.25,-12.727) 34(5.75,-12.727) 35(6.25,-12.727) 36(6.75,-12.727) 37(7.25,-12.727) 38(7.75,-12.727) 39(8.25,-12.727) 40(8.75,-12.727) 41(9.25,-12.727) 42(9.75,-12.727) 43(10.25,-12.727) 44(10.75,-12.727) 89(10.75,12.727) 90(10.25,12.727) 91(9.75,12.727) 92(9.25,12.727) 93(8.75,12.727) 94(8.25,12.727) 95(7.75,12.727) 96(7.25,12.727) 97(6.75,12.727) 98(6.25,12.727) 99(5.75,12.727) 100(5.25,12.727) 101(4.75,12.727) 102(4.25,12.727) 103(3.75,12.727) 104(3.25,12.727) 105(2.75,12.727) 106(2.25,12.727) 107(1.75,12.727) 108(1.25,12.727) 109(0.75,12.727) 110(0.25,12.727) 111(-0.25,12.727) 112(-0.75,12.727) 113(-1.25,12.727) 114(-1.75,12.727) 115(-2.25,12.727) 116(-2.75,12.727) 117(-3.25,12.727) 118(-3.75,12.727) 119(-4.25,12.727) 120(-4.75,12.727) 121(-5.25,12.727) 122(-5.75,12.727) 123(-6.25,12.727) 124(-6.75,12.727) 125(-7.25,12.727) 126(-7.75,12.727) 127(-8.25,12.727) 128(-8.75,12.727) 129(-9.25,12.727) 130(-9.75,12.727) 131(-10.25,12.727) 132(-10.75,12.727)
  oval 2.1x0.3 smd: 45(12.727,-10.75) 46(12.727,-10.25) 47(12.727,-9.75) 48(12.727,-9.25) 49(12.727,-8.75) 50(12.727,-8.25) 51(12.727,-7.75) 52(12.727,-7.25) 53(12.727,-6.75) 54(12.727,-6.25) 55(12.727,-5.75) 56(12.727,-5.25) 57(12.727,-4.75) 58(12.727,-4.25) 59(12.727,-3.75) 60(12.727,-3.25) 61(12.727,-2.75) 62(12.727,-2.25) 63(12.727,-1.75) 64(12.727,-1.25) 65(12.727,-0.75) 66(12.727,-0.25) 67(12.727,0.25) 68(12.727,0.75) 69(12.727,1.25) 70(12.727,1.75) 71(12.727,2.25) 72(12.727,2.75) 73(12.727,3.25) 74(12.727,3.75) 75(12.727,4.25) 76(12.727,4.75) 77(12.727,5.25) 78(12.727,5.75) 79(12.727,6.25) 80(12.727,6.75) 81(12.727,7.25) 82(12.727,7.75) 83(12.727,8.25) 84(12.727,8.75) 85(12.727,9.25) 86(12.727,9.75) 87(12.727,10.25) 88(12.727,10.75) 133(-12.727,10.75) 134(-12.727,10.25) 135(-12.727,9.75) 136(-12.727,9.25) 137(-12.727,8.75) 138(-12.727,8.25) 139(-12.727,7.75) 140(-12.727,7.25) 141(-12.727,6.75) 142(-12.727,6.25) 143(-12.727,5.75) 144(-12.727,5.25) 145(-12.727,4.75) 146(-12.727,4.25) 147(-12.727,3.75) 148(-12.727,3.25) 149(-12.727,2.75) 150(-12.727,2.25) 151(-12.727,1.75) 152(-12.727,1.25) 153(-12.727,0.75) 154(-12.727,0.25) 155(-12.727,-0.25) 156(-12.727,-0.75) 157(-12.727,-1.25) 158(-12.727,-1.75) 159(-12.727,-2.25) 160(-12.727,-2.75) 161(-12.727,-3.25) 162(-12.727,-3.75) 163(-12.727,-4.25) 164(-12.727,-4.75) 165(-12.727,-5.25) 166(-12.727,-5.75) 167(-12.727,-6.25) 168(-12.727,-6.75) 169(-12.727,-7.25) 170(-12.727,-7.75) 171(-12.727,-8.25) 172(-12.727,-8.75) 173(-12.727,-9.25) 174(-12.727,-9.75) 175(-12.727,-10.25) 176(-12.727,-10.75)
Top Overlay:
  circle w0.508: c-11.811,-13.208 r0.25
  circle w0.254: c-9.144,-9.144 r1.016
  lines w0.254: -10.922,-10.922 -10.922,10.922 10.922,10.922 10.922,-10.922 -10.922,-10.922
Mechanical 13:
  circle w0.1: c-11.1,-11.1 r0.5
  lines w0.1: -12,-12 -12,12 12,12 12,-12 -12,-12
Mechanical 15:
  circle w0.05: c0,0 r0.35
  lines w0.05: -0.5,0 0.5,0 ; 0,-0.5 0,0.5
  lines w0.15: -14.15,-14.15 -14.15,14.15 14.15,14.15 14.15,-14.15 -14.15,-14.15
3D body "LQFP176-24x24.STEP": height 1.45, standoff -0.01, extent -13.003,-13.003 13.003,13.003

## LQFP176 24x24_N [mm] "176脚，体宽24x24mm，脚距0.5mm"
height 1.6
pads (176):
  oval 0.3x1.8 smd: 1(-10.748,-12.575) 2(-10.248,-12.575) 3(-9.748,-12.575) 4(-9.248,-12.575) 5(-8.748,-12.575) 6(-8.248,-12.575) 7(-7.748,-12.575) 8(-7.248,-12.575) 9(-6.748,-12.575) 10(-6.248,-12.575) 11(-5.748,-12.575) 12(-5.248,-12.575) 13(-4.748,-12.575) 14(-4.248,-12.575) 15(-3.748,-12.575) 16(-3.248,-12.575) 17(-2.748,-12.575) 18(-2.248,-12.575) 19(-1.748,-12.575) 20(-1.248,-12.575) 21(-0.748,-12.575) 22(-0.248,-12.575) 23(0.252,-12.575) 24(0.752,-12.575) 25(1.252,-12.575) 26(1.752,-12.575) 27(2.252,-12.575) 28(2.752,-12.575) 29(3.252,-12.575) 30(3.752,-12.575) 31(4.252,-12.575) 32(4.752,-12.575) 33(5.252,-12.575) 34(5.752,-12.575) 35(6.252,-12.575) 36(6.752,-12.575) 37(7.252,-12.575) 38(7.752,-12.575) 39(8.252,-12.575) 40(8.752,-12.575) 41(9.252,-12.575) 42(9.752,-12.575) 43(10.252,-12.575) 44(10.752,-12.575) 89(10.752,12.575) 90(10.252,12.575) 91(9.752,12.575) 92(9.252,12.575) 93(8.752,12.575) 94(8.252,12.575) 95(7.752,12.575) 96(7.252,12.575) 97(6.752,12.575) 98(6.252,12.575) 99(5.752,12.575) 100(5.252,12.575) 101(4.752,12.575) 102(4.252,12.575) 103(3.752,12.575) 104(3.252,12.575) 105(2.752,12.575) 106(2.252,12.575) 107(1.752,12.575) 108(1.252,12.575) 109(0.752,12.575) 110(0.252,12.575) 111(-0.248,12.575) 112(-0.748,12.575) 113(-1.248,12.575) 114(-1.748,12.575) 115(-2.248,12.575) 116(-2.748,12.575) 117(-3.248,12.575) 118(-3.748,12.575) 119(-4.248,12.575) 120(-4.748,12.575) 121(-5.248,12.575) 122(-5.748,12.575) 123(-6.248,12.575) 124(-6.748,12.575) 125(-7.248,12.575) 126(-7.748,12.575) 127(-8.248,12.575) 128(-8.748,12.575) 129(-9.248,12.575) 130(-9.748,12.575) 131(-10.248,12.575) 132(-10.748,12.575)
  oval 1.8x0.3 smd: 45(12.578,-10.75) 46(12.578,-10.25) 47(12.578,-9.75) 48(12.578,-9.25) 49(12.578,-8.75) 50(12.578,-8.25) 51(12.578,-7.75) 52(12.578,-7.25) 53(12.578,-6.75) 54(12.578,-6.25) 55(12.578,-5.75) 56(12.578,-5.25) 57(12.578,-4.75) 58(12.578,-4.25) 59(12.578,-3.75) 60(12.578,-3.25) 61(12.578,-2.75) 62(12.578,-2.25) 63(12.578,-1.75) 64(12.578,-1.25) 65(12.578,-0.75) 66(12.578,-0.25) 67(12.578,0.25) 68(12.578,0.75) 69(12.578,1.25) 70(12.578,1.75) 71(12.578,2.25) 72(12.578,2.75) 73(12.578,3.25) 74(12.578,3.75) 75(12.578,4.25) 76(12.578,4.75) 77(12.578,5.25) 78(12.578,5.75) 79(12.578,6.25) 80(12.578,6.75) 81(12.578,7.25) 82(12.578,7.75) 83(12.578,8.25) 84(12.578,8.75) 85(12.578,9.25) 86(12.578,9.75) 87(12.578,10.25) 88(12.578,10.75) 133(-12.573,10.75) 134(-12.573,10.25) 135(-12.573,9.75) 136(-12.573,9.25) 137(-12.573,8.75) 138(-12.573,8.25) 139(-12.573,7.75) 140(-12.573,7.25) 141(-12.573,6.75) 142(-12.573,6.25) 143(-12.573,5.75) 144(-12.573,5.25) 145(-12.573,4.75) 146(-12.573,4.25) 147(-12.573,3.75) 148(-12.573,3.25) 149(-12.573,2.75) 150(-12.573,2.25) 151(-12.573,1.75) 152(-12.573,1.25) 153(-12.573,0.75) 154(-12.573,0.25) 155(-12.573,-0.25) 156(-12.573,-0.75) 157(-12.573,-1.25) 158(-12.573,-1.75) 159(-12.573,-2.25) 160(-12.573,-2.75) 161(-12.573,-3.25) 162(-12.573,-3.75) 163(-12.573,-4.25) 164(-12.573,-4.75) 165(-12.573,-5.25) 166(-12.573,-5.75) 167(-12.573,-6.25) 168(-12.573,-6.75) 169(-12.573,-7.25) 170(-12.573,-7.75) 171(-12.573,-8.25) 172(-12.573,-8.75) 173(-12.573,-9.25) 174(-12.573,-9.75) 175(-12.573,-10.25) 176(-12.573,-10.75)
Top Overlay:
  circle w0.508: c-11.811,-12.827 r0.25
  circle w0.254: c-9.142,-9.144 r1.016
  lines w0.254: -10.92,-10.922 -10.92,10.922 10.924,10.922 10.924,-10.922 -10.92,-10.922
Mechanical 13:
  circle w0.1: c-11.098,-11.1 r0.5
  lines w0.1: -11.998,-12 -11.998,12 12.002,12 12.002,-12 -11.998,-12
Mechanical 15:
  circle w0.05: c0.002,0 r0.35
  lines w0.05: -0.498,0 0.502,0 ; 0.002,-0.5 0.002,0.5
  lines w0.15: -13.843,-13.843 -13.843,13.843 13.843,13.843 13.843,-13.843 -13.843,-13.843
3D body "LQFP176-24x24.STEP": height 1.45, standoff -0.01, extent -13,-13.003 13.005,13.003

## LQFP176-24*24 [mm] "24x24mm，0.5mm       淘宝ID:黄晶宝石"
height 1.6
pads (176):
  oval 0.3x1.8 smd: 1(-10.748,-12.575) 2(-10.248,-12.575) 3(-9.748,-12.575) 4(-9.248,-12.575) 5(-8.748,-12.575) 6(-8.248,-12.575) 7(-7.748,-12.575) 8(-7.248,-12.575) 9(-6.748,-12.575) 10(-6.248,-12.575) 11(-5.748,-12.575) 12(-5.248,-12.575) 13(-4.748,-12.575) 14(-4.248,-12.575) 15(-3.748,-12.575) 16(-3.248,-12.575) 17(-2.748,-12.575) 18(-2.248,-12.575) 19(-1.748,-12.575) 20(-1.248,-12.575) 21(-0.748,-12.575) 22(-0.248,-12.575) 23(0.252,-12.575) 24(0.752,-12.575) 25(1.252,-12.575) 26(1.752,-12.575) 27(2.252,-12.575) 28(2.752,-12.575) 29(3.252,-12.575) 30(3.752,-12.575) 31(4.252,-12.575) 32(4.752,-12.575) 33(5.252,-12.575) 34(5.752,-12.575) 35(6.252,-12.575) 36(6.752,-12.575) 37(7.252,-12.575) 38(7.752,-12.575) 39(8.252,-12.575) 40(8.752,-12.575) 41(9.252,-12.575) 42(9.752,-12.575) 43(10.252,-12.575) 44(10.752,-12.575) 89(10.752,12.575) 90(10.252,12.575) 91(9.752,12.575) 92(9.252,12.575) 93(8.752,12.575) 94(8.252,12.575) 95(7.752,12.575) 96(7.252,12.575) 97(6.752,12.575) 98(6.252,12.575) 99(5.752,12.575) 100(5.252,12.575) 101(4.752,12.575) 102(4.252,12.575) 103(3.752,12.575) 104(3.252,12.575) 105(2.752,12.575) 106(2.252,12.575) 107(1.752,12.575) 108(1.252,12.575) 109(0.752,12.575) 110(0.252,12.575) 111(-0.248,12.575) 112(-0.748,12.575) 113(-1.248,12.575) 114(-1.748,12.575) 115(-2.248,12.575) 116(-2.748,12.575) 117(-3.248,12.575) 118(-3.748,12.575) 119(-4.248,12.575) 120(-4.748,12.575) 121(-5.248,12.575) 122(-5.748,12.575) 123(-6.248,12.575) 124(-6.748,12.575) 125(-7.248,12.575) 126(-7.748,12.575) 127(-8.248,12.575) 128(-8.748,12.575) 129(-9.248,12.575) 130(-9.748,12.575) 131(-10.248,12.575) 132(-10.748,12.575)
  oval 1.8x0.3 smd: 45(12.578,-10.75) 46(12.578,-10.25) 47(12.578,-9.75) 48(12.578,-9.25) 49(12.578,-8.75) 50(12.578,-8.25) 51(12.578,-7.75) 52(12.578,-7.25) 53(12.578,-6.75) 54(12.578,-6.25) 55(12.578,-5.75) 56(12.578,-5.25) 57(12.578,-4.75) 58(12.578,-4.25) 59(12.578,-3.75) 60(12.578,-3.25) 61(12.578,-2.75) 62(12.578,-2.25) 63(12.578,-1.75) 64(12.578,-1.25) 65(12.578,-0.75) 66(12.578,-0.25) 67(12.578,0.25) 68(12.578,0.75) 69(12.578,1.25) 70(12.578,1.75) 71(12.578,2.25) 72(12.578,2.75) 73(12.578,3.25) 74(12.578,3.75) 75(12.578,4.25) 76(12.578,4.75) 77(12.578,5.25) 78(12.578,5.75) 79(12.578,6.25) 80(12.578,6.75) 81(12.578,7.25) 82(12.578,7.75) 83(12.578,8.25) 84(12.578,8.75) 85(12.578,9.25) 86(12.578,9.75) 87(12.578,10.25) 88(12.578,10.75) 133(-12.573,10.75) 134(-12.573,10.25) 135(-12.573,9.75) 136(-12.573,9.25) 137(-12.573,8.75) 138(-12.573,8.25) 139(-12.573,7.75) 140(-12.573,7.25) 141(-12.573,6.75) 142(-12.573,6.25) 143(-12.573,5.75) 144(-12.573,5.25) 145(-12.573,4.75) 146(-12.573,4.25) 147(-12.573,3.75) 148(-12.573,3.25) 149(-12.573,2.75) 150(-12.573,2.25) 151(-12.573,1.75) 152(-12.573,1.25) 153(-12.573,0.75) 154(-12.573,0.25) 155(-12.573,-0.25) 156(-12.573,-0.75) 157(-12.573,-1.25) 158(-12.573,-1.75) 159(-12.573,-2.25) 160(-12.573,-2.75) 161(-12.573,-3.25) 162(-12.573,-3.75) 163(-12.573,-4.25) 164(-12.573,-4.75) 165(-12.573,-5.25) 166(-12.573,-5.75) 167(-12.573,-6.25) 168(-12.573,-6.75) 169(-12.573,-7.25) 170(-12.573,-7.75) 171(-12.573,-8.25) 172(-12.573,-8.75) 173(-12.573,-9.25) 174(-12.573,-9.75) 175(-12.573,-10.25) 176(-12.573,-10.75)
Top Overlay:
  circle w0.508: c-11.811,-12.827 r0.25
  lines w0.254: -10.92,-10.922 10.924,-10.922 10.924,10.922 -10.92,10.922 -10.92,-10.922
Mechanical 13:
  lines w0.1: -11.998,-12 12.002,-12 12.002,12 -11.998,12 -11.998,-12
3D body "LQFP176-24x24.STEP": height 1.45, standoff 0, extent -13.003,-13.003 13.003,13.003

## LQFP176_L [mm] "Thin QFP, 176-Leads, Body 24x24mm, Pitch 0.5mm, IPC High Density"
height 1.6
pads (176):
  oval 1.55x0.25 smd: 1(-12.525,10.75) 2(-12.525,10.25) 3(-12.525,9.75) 4(-12.525,9.25) 5(-12.525,8.75) 6(-12.525,8.25) 7(-12.525,7.75) 8(-12.525,7.25) 9(-12.525,6.75) 10(-12.525,6.25) 11(-12.525,5.75) 12(-12.525,5.25) 13(-12.525,4.75) 14(-12.525,4.25) 15(-12.525,3.75) 16(-12.525,3.25) 17(-12.525,2.75) 18(-12.525,2.25) 19(-12.525,1.75) 20(-12.525,1.25) 21(-12.525,0.75) 22(-12.525,0.25) 23(-12.525,-0.25) 24(-12.525,-0.75) 25(-12.525,-1.25) 26(-12.525,-1.75) 27(-12.525,-2.25) 28(-12.525,-2.75) 29(-12.525,-3.25) 30(-12.525,-3.75) 31(-12.525,-4.25) 32(-12.525,-4.75) 33(-12.525,-5.25) 34(-12.525,-5.75) 35(-12.525,-6.25) 36(-12.525,-6.75) 37(-12.525,-7.25) 38(-12.525,-7.75) 39(-12.525,-8.25) 40(-12.525,-8.75) 41(-12.525,-9.25) 42(-12.525,-9.75) 43(-12.525,-10.25) 44(-12.525,-10.75) 89(12.525,-10.75) 90(12.525,-10.25) 91(12.525,-9.75) 92(12.525,-9.25) 93(12.525,-8.75) 94(12.525,-8.25) 95(12.525,-7.75) 96(12.525,-7.25) 97(12.525,-6.75) 98(12.525,-6.25) 99(12.525,-5.75) 100(12.525,-5.25) 101(12.525,-4.75) 102(12.525,-4.25) 103(12.525,-3.75) 104(12.525,-3.25) 105(12.525,-2.75) 106(12.525,-2.25) 107(12.525,-1.75) 108(12.525,-1.25) 109(12.525,-0.75) 110(12.525,-0.25) 111(12.525,0.25) 112(12.525,0.75) 113(12.525,1.25) 114(12.525,1.75) 115(12.525,2.25) 116(12.525,2.75) 117(12.525,3.25) 118(12.525,3.75) 119(12.525,4.25) 120(12.525,4.75) 121(12.525,5.25) 122(12.525,5.75) 123(12.525,6.25) 124(12.525,6.75) 125(12.525,7.25) 126(12.525,7.75) 127(12.525,8.25) 128(12.525,8.75) 129(12.525,9.25) 130(12.525,9.75) 131(12.525,10.25) 132(12.525,10.75)
  oval 0.25x1.55 smd: 45(-10.75,-12.525) 46(-10.25,-12.525) 47(-9.75,-12.525) 48(-9.25,-12.525) 49(-8.75,-12.525) 50(-8.25,-12.525) 51(-7.75,-12.525) 52(-7.25,-12.525) 53(-6.75,-12.525) 54(-6.25,-12.525) 55(-5.75,-12.525) 56(-5.25,-12.525) 57(-4.75,-12.525) 58(-4.25,-12.525) 59(-3.75,-12.525) 60(-3.25,-12.525) 61(-2.75,-12.525) 62(-2.25,-12.525) 63(-1.75,-12.525) 64(-1.25,-12.525) 65(-0.75,-12.525) 66(-0.25,-12.525) 67(0.25,-12.525) 68(0.75,-12.525) 69(1.25,-12.525) 70(1.75,-12.525) 71(2.25,-12.525) 72(2.75,-12.525) 73(3.25,-12.525) 74(3.75,-12.525) 75(4.25,-12.525) 76(4.75,-12.525) 77(5.25,-12.525) 78(5.75,-12.525) 79(6.25,-12.525) 80(6.75,-12.525) 81(7.25,-12.525) 82(7.75,-12.525) 83(8.25,-12.525) 84(8.75,-12.525) 85(9.25,-12.525) 86(9.75,-12.525) 87(10.25,-12.525) 88(10.75,-12.525) 133(10.75,12.525) 134(10.25,12.525) 135(9.75,12.525) 136(9.25,12.525) 137(8.75,12.525) 138(8.25,12.525) 139(7.75,12.525) 140(7.25,12.525) 141(6.75,12.525) 142(6.25,12.525) 143(5.75,12.525) 144(5.25,12.525) 145(4.75,12.525) 146(4.25,12.525) 147(3.75,12.525) 148(3.25,12.525) 149(2.75,12.525) 150(2.25,12.525) 151(1.75,12.525) 152(1.25,12.525) 153(0.75,12.525) 154(0.25,12.525) 155(-0.25,12.525) 156(-0.75,12.525) 157(-1.25,12.525) 158(-1.75,12.525) 159(-2.25,12.525) 160(-2.75,12.525) 161(-3.25,12.525) 162(-3.75,12.525) 163(-4.25,12.525) 164(-4.75,12.525) 165(-5.25,12.525) 166(-5.75,12.525) 167(-6.25,12.525) 168(-6.75,12.525) 169(-7.25,12.525) 170(-7.75,12.525) 171(-8.25,12.525) 172(-8.75,12.525) 173(-9.25,12.525) 174(-9.75,12.525) 175(-10.25,12.525) 176(-10.75,12.525)
Top Overlay:
  circle w0.25: c-12.525,11.425 r0.125
  circle w0.6: c-10.35,10.35 r0.3
  lines w0.2: -11.35,-11.35 -11.35,11.35 11.35,11.35 11.35,-11.35 -11.35,-11.35
Mechanical 13:
  circle w0.1: c-11.1,11.1 r0.5
  lines w0.1: -12,-12 -12,12 12,12 12,-12 -12,-12
Mechanical 15:
  lines w0.05: -13.4,-13.4 -13.4,13.4 13.4,13.4 13.4,-13.4 -13.4,-13.4
  lines w0.1: -0.5,0 0.5,0 ; 0,-0.5 0,0.5
3D body: height 1.6, standoff 0, extent -12,-12 12,12